# Altium footprint library Altium_Lib_Haris.PcbLib: 85 footprints (part 1 of 6)
Each footprint in its own frame and in the unit in brackets; x right, y up, seen from the top. Pads: shape width x height; smd on the part's side, far side on the other; paste and mask are expansions set on the pad; w line width, h text height; cw(c..) or ccw(c..) is an arc to the next point about the centre after c.
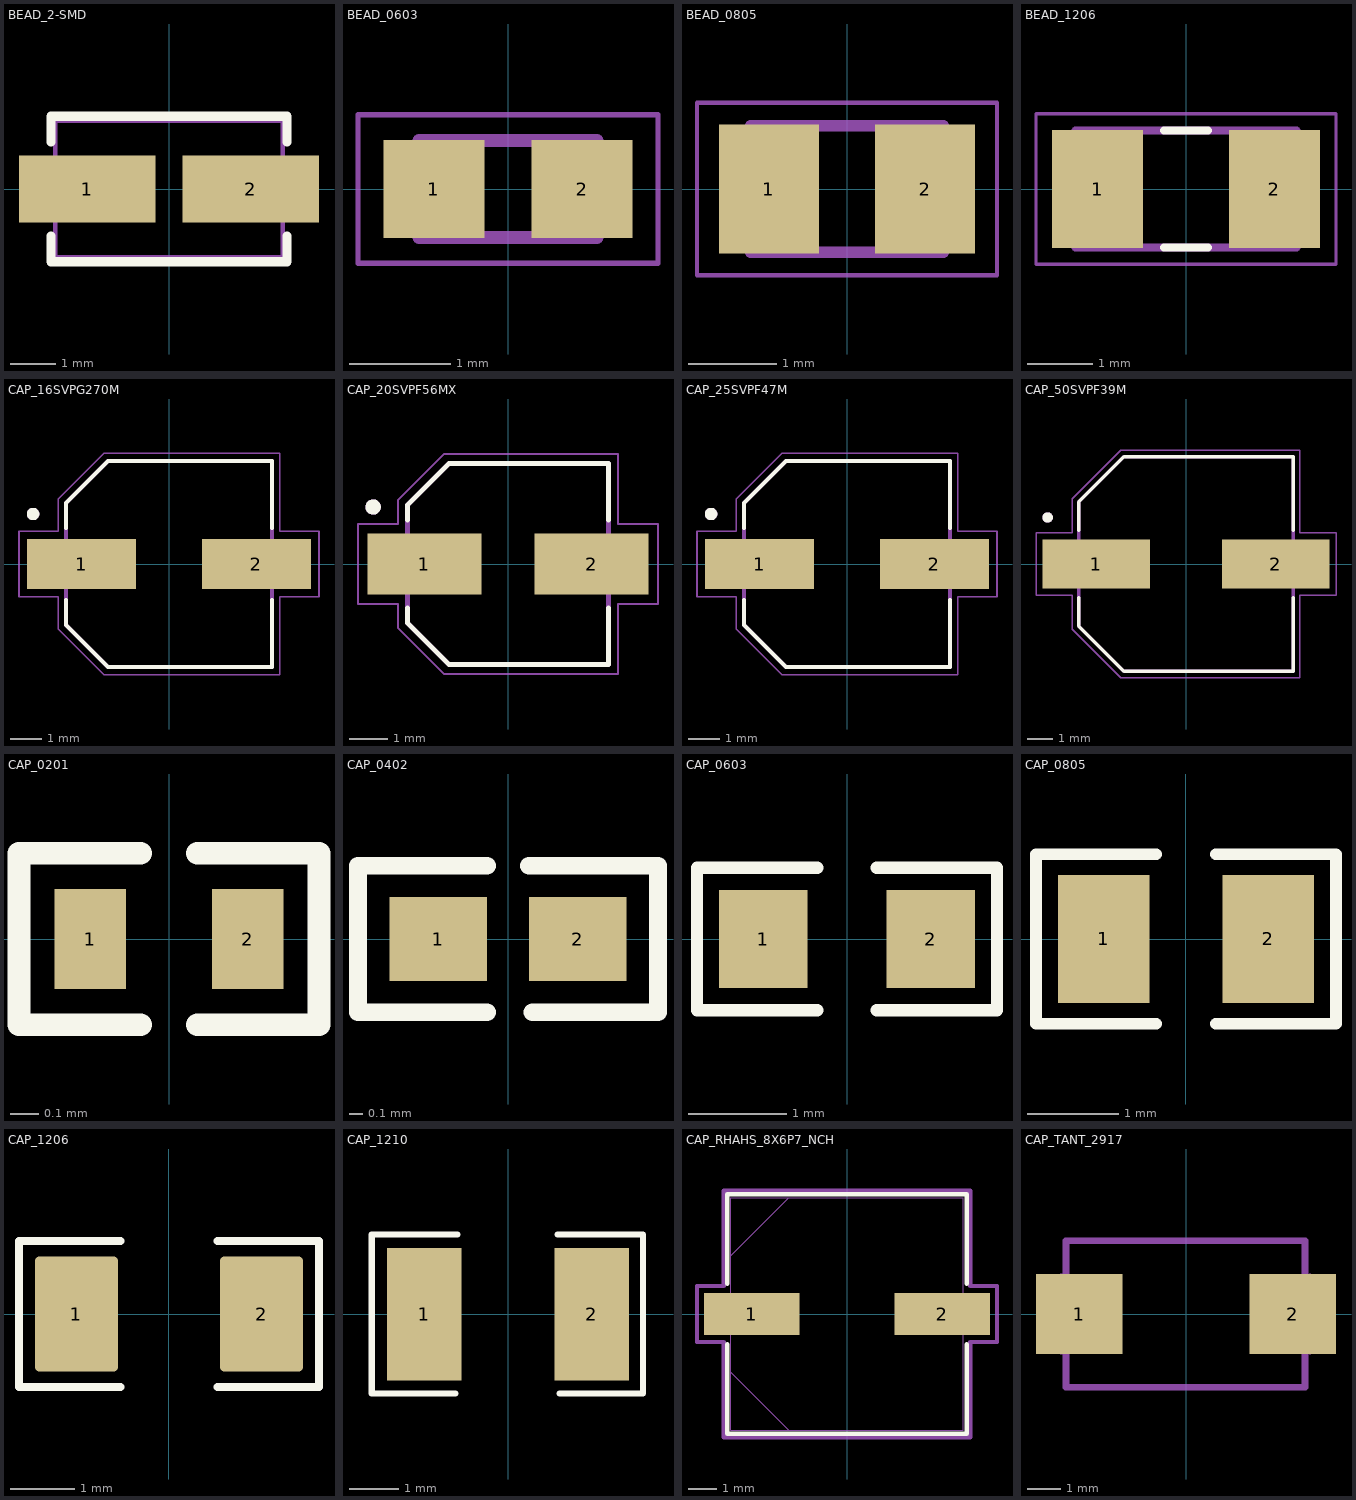
[diagram p0: the footprints below, top view; thin cyan lines are the x and y axes]

## BEAD_2-SMD [mm] "J-Lead"
pads (2):
  rect 3x1.47 smd paste+0 mask+0.102: 1(-1.8,0) 2(1.8,0)
Top Overlay:
  lines w0.2: -2.6,-1.035 -2.6,-1.6 2.6,-1.6 2.6,-1.035 ; -2.6,1.035 -2.6,1.6 2.6,1.6 2.6,1.035
Mechanical 13:
  lines w0.1: -2.5,-1.5 -2.5,1.5 2.5,1.5 2.5,-1.5 -2.5,-1.5
3D body "step_temp.STEP": height 2.76, standoff 0.01, extent -2.2,-1.5 2.2,1.5

## BEAD_0603 [mm]
pads (2):
  rect 1x0.97 smd: 1(-0.735,0) 2(0.735,0)
Mechanical 13:
  lines w0.127: -0.88,-0.48 -0.88,0.48 0.88,0.48 0.88,-0.48 -0.88,-0.48
Mechanical 15:
  lines w0.05: -1.485,-0.735 -1.485,0.735 1.485,0.735 1.485,-0.735 -1.485,-0.735
3D body "BLE18PS080BH1D--3DModel-STEP-1.STEP": height 0.76, standoff 0.01, extent -0.8,-0.4 0.8,0.4

## BEAD_0805 [mm]
pads (2):
  rect 1.14x1.47 smd: 1(-0.89,0) 2(0.89,0)
Mechanical 13:
  lines w0.127: -1.1,-0.72 -1.1,0.72 1.1,0.72 1.1,-0.72 -1.1,-0.72
Mechanical 15:
  lines w0.05: -1.708,-0.983 -1.708,0.983 1.708,0.983 1.708,-0.983 -1.708,-0.983
3D body "BLM21SP111BH1D.STEP": height 1.06, standoff 0.01, extent -1,-0.65 1,0.6

## BEAD_1206 [mm]
pads (2):
  rect 1.4x1.82 smd: 1(-1.36,0) 2(1.36,0)
Top Overlay:
  lines w0.127: -0.34,-0.9 0.34,-0.9 ; -0.34,0.9 0.34,0.9
Mechanical 13:
  lines w0.127: -1.7,-0.9 -1.7,0.9 1.7,0.9 1.7,-0.9 -1.7,-0.9
Mechanical 15:
  lines w0.05: -2.308,-1.158 -2.308,1.158 2.308,1.158 2.308,-1.158 -2.308,-1.158
3D body "BEADC3216X130N.step": height 1.31, standoff 0.01, extent -1.6,-0.8 1.6,0.8

## CAP_16SVPG270M [mm]
height 9.9
pads (2):
  rect 3.5x1.6 smd: 1(-2.8,0) 2(2.8,0)
Top Overlay:
  circle w0.2: c-4.35,1.6 r0.1
  lines w0.127: -3.3,-1.15 -3.3,-1.95 -1.95,-3.3 3.3,-3.3 3.3,-1.15 ; -3.3,1.15 -3.3,1.95 -1.95,3.3 3.3,3.3 3.3,1.15
Mechanical 13:
  circle w0.2: c-4.35,1.6 r0.1
  lines w0.127: -3.3,-1.95 -3.3,1.95 -1.95,3.3 3.3,3.3 3.3,-3.3 -1.95,-3.3 -3.3,-1.95
Mechanical 15:
  lines w0.05: -4.8,-1.05 -4.8,1.05 -3.55,1.05 -3.55,2.075 -2.075,3.55 3.55,3.55 3.55,1.05 4.8,1.05 4.8,-1.05 3.55,-1.05 3.55,-3.55 -2.075,-3.55 -3.55,-2.075 -3.55,-1.05 -4.8,-1.05
3D body "step_temp.STEP": height 9.9, standoff 0, extent -3.65,-3.3 3.65,3.3

## CAP_20SVPF56MX [mm]
height 5.9
pads (2):
  rect 3x1.6 smd: 1(-2.2,0) 2(2.2,0)
Top Overlay:
  circle w0.2: c-3.55,1.5 r0.1
  lines w0.127: -2.65,-1.15 -2.65,-1.55 -1.55,-2.65 2.65,-2.65 2.65,-1.15 ; -2.65,1.15 -2.65,1.55 -1.55,2.65 2.65,2.65 2.65,1.15
Mechanical 13:
  circle w0.2: c-3.55,1.5 r0.1
  lines w0.127: -2.65,-1.55 -2.65,1.55 -1.55,2.65 2.65,2.65 2.65,-2.65 -1.55,-2.65 -2.65,-1.55
Mechanical 15:
  lines w0.05: -3.95,-1.05 -3.95,1.05 -2.9,1.05 -2.9,1.675 -1.675,2.9 2.9,2.9 2.9,1.05 3.95,1.05 3.95,-1.05 2.9,-1.05 2.9,-2.9 -1.675,-2.9 -2.9,-1.675 -2.9,-1.05 -3.95,-1.05
3D body "step_temp.STEP": height 5.9, standoff 0, extent -3,-2.65 3,2.65

## CAP_25SVPF47M [mm]
height 5.9
pads (2):
  rect 3.5x1.6 smd: 1(-2.8,0) 2(2.8,0)
Top Overlay:
  circle w0.2: c-4.35,1.6 r0.1
  lines w0.127: -3.3,-1.15 -3.3,-1.95 -1.95,-3.3 3.3,-3.3 3.3,-1.15 ; -3.3,1.15 -3.3,1.95 -1.95,3.3 3.3,3.3 3.3,1.15
Mechanical 13:
  circle w0.2: c-4.35,1.6 r0.1
  lines w0.127: -3.3,-1.95 -1.95,-3.3 3.3,-3.3 3.3,3.3 -1.95,3.3 -3.3,1.95 -3.3,-1.95
Mechanical 15:
  lines w0.05: -4.8,-1.05 -3.55,-1.05 -3.55,-2.075 -2.075,-3.55 3.55,-3.55 3.55,-1.05 4.8,-1.05 4.8,1.05 3.55,1.05 3.55,3.55 -2.075,3.55 -3.55,2.075 -3.55,1.05 -4.8,1.05 -4.8,-1.05
3D body "step_temp.STEP": height 5.9, standoff 0, extent -3.65,-3.3 3.65,3.3

## CAP_50SVPF39M [mm]
height 11.9
pads (2):
  rect 4.15x1.9 smd: 1(-3.475,0) 2(3.475,0)
Top Overlay:
  circle w0.2: c-5.35,1.8 r0.1
  lines w0.127: -4.15,-1.3 -4.15,-2.4 -2.4,-4.15 4.15,-4.15 4.15,-1.3 ; -4.15,1.3 -4.15,2.4 -2.4,4.15 4.15,4.15 4.15,1.3
Mechanical 13:
  circle w0.2: c-5.35,1.8 r0.1
  lines w0.127: -4.15,-2.4 -4.15,2.4 -2.4,4.15 4.15,4.15 4.15,-4.15 -2.4,-4.15 -4.15,-2.4
Mechanical 15:
  lines w0.05: -5.8,-1.2 -5.8,1.2 -4.4,1.2 -4.4,2.525 -2.525,4.4 4.4,4.4 4.4,1.2 5.8,1.2 5.8,-1.2 4.4,-1.2 4.4,-4.4 -2.525,-4.4 -4.4,-2.525 -4.4,-1.2 -5.8,-1.2
3D body "step_temp.STEP": height 11.9, standoff 0, extent -4.5,-4.15 4.5,4.15

## CAP_0201 [mm] "Ceramic Capacitor"
height 0.9
pads (2):
  rect 0.25x0.35 smd mask+0.05: 1(-0.275,0) 2(0.275,0)
Top Overlay:
  lines w0.08: -0.1,-0.3 -0.525,-0.3 -0.525,0.3 -0.1,0.3 ; 0.1,-0.3 0.525,-0.3 0.525,0.3 0.1,0.3
3D body "C0201.STEP": height 0.31, standoff 0.01, extent -0.3,-0.165 0.3,0.166

## CAP_0402 [mm] "Ceramic Capacitor"
height 0.9
pads (2):
  rect 0.7x0.6 smd: 1(-0.5,0) 2(0.5,0)
Top Overlay:
  lines w0.127: -0.15,-0.525 -1.075,-0.525 -1.075,0.525 -0.15,0.525 ; 0.15,0.525 1.075,0.525 1.075,-0.525 0.175,-0.525
3D body "C0402.STEP": height 0.51, standoff 0.01, extent -0.5,-0.275 0.5,0.276

## CAP_0603 [mm] "Ceramic Capacitor"
height 0.9
pads (2):
  rect 0.9x1 smd: 1(-0.85,0) 2(0.85,0)
Top Overlay:
  lines w0.127: -0.3,-0.725 -1.525,-0.725 -1.525,0.725 -0.3,0.725 ; 0.3,-0.725 1.525,-0.725 1.525,0.725 0.3,0.725
3D body "C0603.STEP": height 0.81, standoff 0.01, extent -0.8,-0.451 0.8,0.45

## CAP_0805 [mm] "Ceramic Capacitor"
height 0.7
pads (2):
  rect 1x1.4 smd: 1(-0.9,0) 2(0.9,0)
Top Overlay:
  lines w0.127: -0.325,-0.925 -1.639,-0.925 -1.639,0.925 -0.325,0.925 ; 0.325,-0.925 1.639,-0.925 1.639,0.925 0.325,0.925
3D body "C0805.STEP": height 1.26, standoff 0.01, extent -1.025,-0.676 0.975,0.675

## CAP_1206 [mm] "Ceramic Capacitor"
height 1.6
pads (2):
  rrect10% 1.3x1.8 smd: 1(-1.45,0) 2(1.45,0)
Top Overlay:
  lines w0.127: -0.762,-1.143 -2.35,-1.143 -2.35,1.143 -0.762,1.143 ; 0.762,-1.143 2.35,-1.143 2.35,1.143 0.762,1.143
3D body "C1206.STEP": height 1.61, standoff 0.01, extent -1.6,-0.675 1.6,0.725

## CAP_1210 [mil] "Ceramic Capacitor"
height 98.43
pads (2):
  rect 60x106.3 smd: 1(-67.5,0) 2(67.5,0)
Top Overlay:
  lines w5: -42.5,-63.81 -109.5,-63.81 -109.5,64.18 -40.84,64.18 ; 39.86,64.18 108.52,64.18 108.52,-63.81 41.52,-63.81
3D body "C1210.STEP": height 98.93, standoff 0.5, extent -62.99,-53.19 62.99,53.15

## CAP_RHAHS_8X6P7_NCH [mil]
pads (2):
  rect 134x59 smd paste+0 mask+0: 1(-134,0) 2(134,0)
Top Overlay:
  lines w6: -168.5,-42.6 -168.5,-168.5 168.5,-168.5 168.5,-42.6 ; -168.5,42.6 -168.5,168.5 168.5,168.5 168.5,42.6
Mechanical 13:
  lines w1: -163.5,-81.75 -81.75,-163.5 ; -163.5,81.75 -81.75,163.5 ; -163.5,-163.5 -163.5,163.5 163.5,163.5 163.5,-163.5 -163.5,-163.5
Mechanical 15:
  lines w6: -211,-39.5 -173.5,-39.5 -173.5,-173.5 173.5,-173.5 173.5,-39.5 211,-39.5 211,39.5 173.5,39.5 173.5,173.5 -173.5,173.5 -173.5,39.5 -211,39.5 -211,-39.5
3D body "CAP_RHAHS_8X6P7_NCH.step": height 278.11, standoff 0, extent -180.98,-163.5 180.98,163.5

## CAP_TANT_2917 [mm]
pads (2):
  rect 2.6x2.4 smd paste+0 mask+0.102: 1(-3.2,0) 2(3.2,0)
Mechanical 13:
  lines w0.152: -3.742,-1.142 -3.742,1.144 ; 3.726,-1.142 3.726,1.144
  lines w0.203: -3.098,0.001 -2.048,0.001 ; -2.558,-0.519 -2.558,0.521 ; -3.6,-2.194 3.574,-2.194 3.574,2.196 -3.6,2.196 -3.6,-2.194
3D body "step_temp.STEP": height 3.1, standoff 0, extent -3.65,-2.15 3.65,2.15